# Altium footprint library IC.PcbLib: 19 footprints (part 1 of 2)
Each footprint in its own frame and in the unit in brackets; x right, y up, seen from the top. Pads: shape width x height; smd on the part's side, far side on the other; paste and mask are expansions set on the pad; w line width, h text height; cw(c..) or ccw(c..) is an arc to the next point about the centre after c.
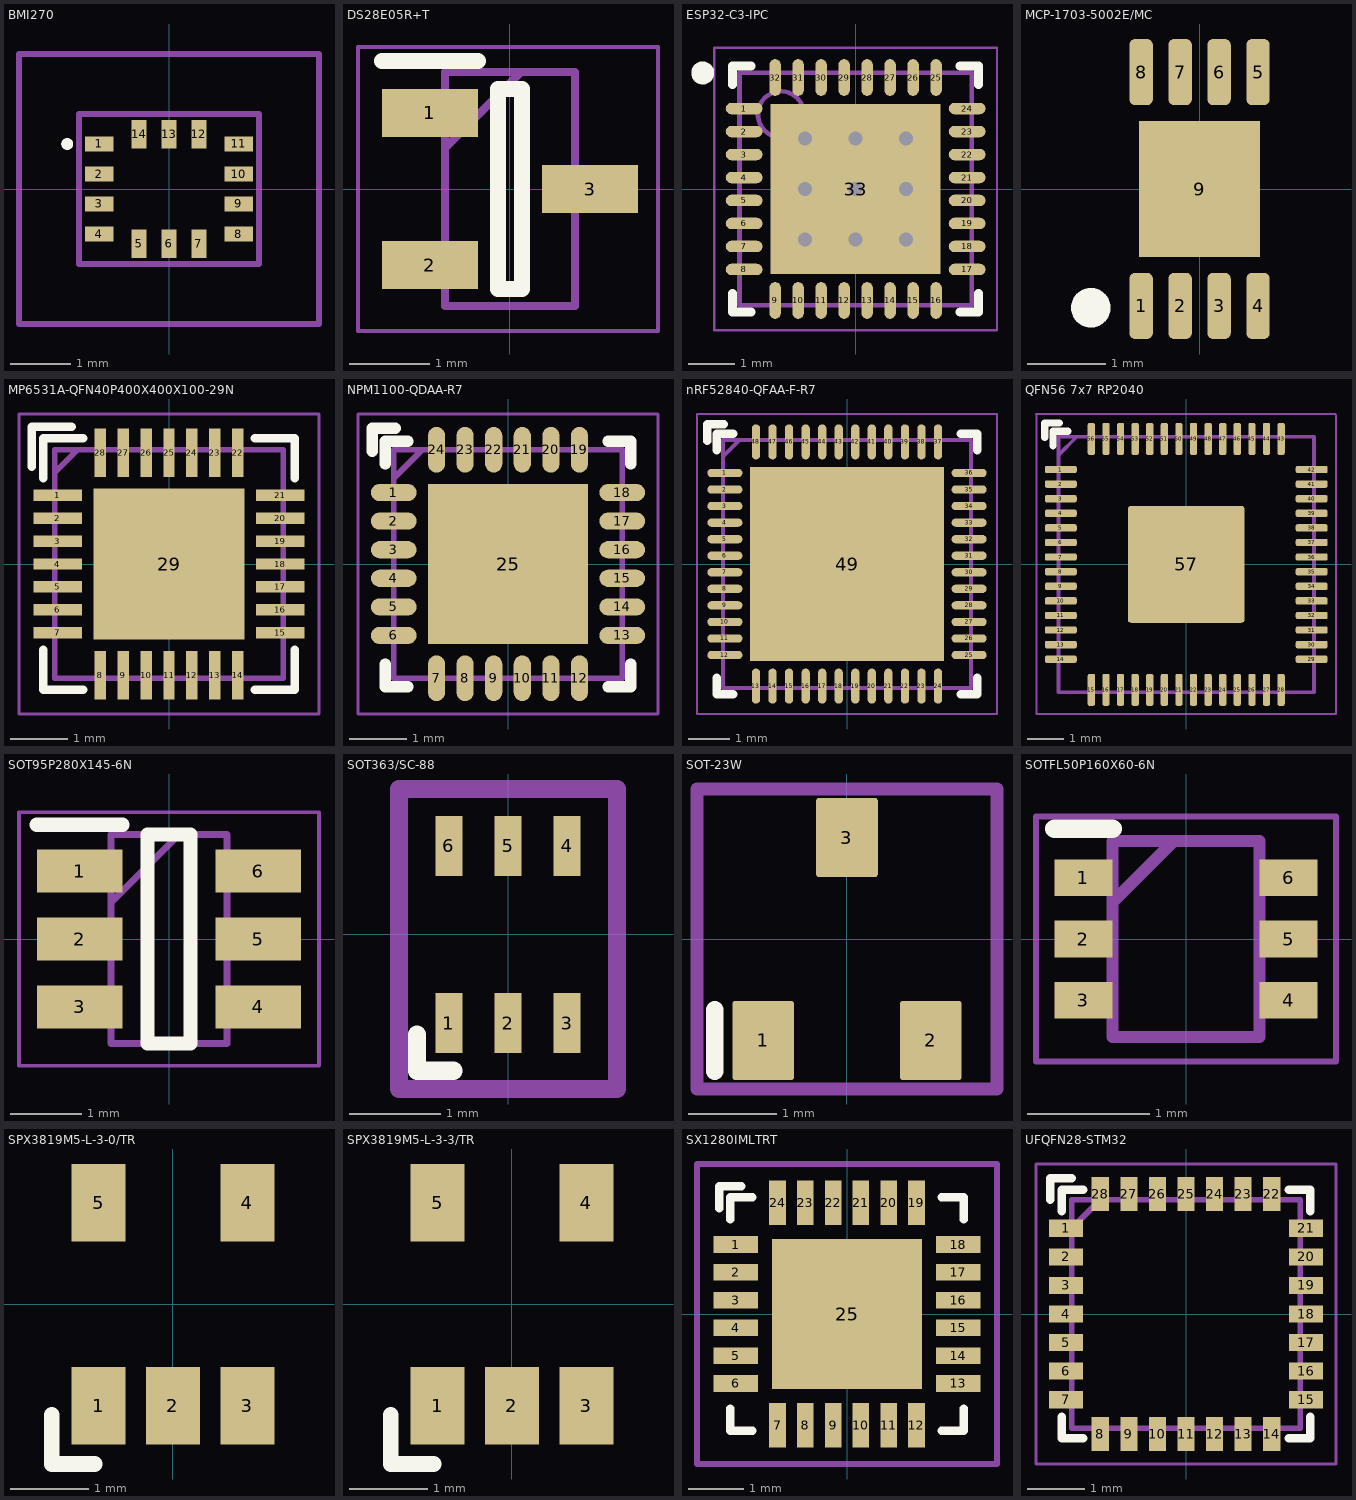
[diagram p0: the footprints below, top view; thin cyan lines are the x and y axes]

## BMI270 [mm]
pads (14):
  rect 0.475x0.25 smd paste-0.01 mask+0.04: 1(-1.163,0.75) 2(-1.163,0.25) 3(-1.163,-0.25) 4(-1.163,-0.75) 8(1.162,-0.75) 9(1.162,-0.25) 10(1.162,0.25) 11(1.162,0.75)
  rect 0.25x0.475 smd paste-0.01 mask+0.04: 5(-0.5,-0.913) 6(0,-0.913) 7(0.5,-0.913) 12(0.5,0.913) 13(0,0.913) 14(-0.5,0.913)
Top Overlay:
  lines w0.1: -1.746,0.75 ccw(c-1.696,0.75) -1.646,0.75 ccw(c-1.696,0.75) -1.746,0.75
Mechanical 15:
  lines w0.1: -1.5,-1.25 1.5,-1.25 1.5,1.25 -1.5,1.25 -1.5,-1.25
Mechanical 20:
  lines w0.1: -2.5,-2.25 2.5,-2.25 2.5,2.25 -2.5,2.25 -2.5,-2.25
3D body "BMI270.stp": height 0.7, standoff -0.13, extent -1.5,-1.25 1.5,1.25

## DS28E05R+T [mm] "EEPROM 1-Wire 112-BYTE EEPROM, SOT23 T&R"
pads (3):
  rect 1.2x0.6 smd: 1(-1,0.95) 2(-1,-0.95) 3(1,0)
Top Overlay:
  lines w0.2: -1.6,1.6 -0.4,1.6 ; -0.15,-1.25 -0.15,1.25 0.15,1.25 0.15,-1.25 -0.15,-1.25
Mechanical 13:
  lines w0.1: -0.812,0.512 0.138,1.462 ; -0.812,-1.462 0.812,-1.462 0.812,1.462 -0.812,1.462 -0.812,-1.462
Mechanical 15:
  lines w0.05: -1.9,-1.775 1.85,-1.775 1.85,1.775 -1.9,1.775 -1.9,-1.775
3D body "DS28E05R+T.stp": height 1.12, standoff 0, extent -1.185,-1.46 1.185,1.46

## ESP32-C3-IPC [mm] "QFN, 32-Leads, Body 5,00x5,00mm, Pitch 0,50mm, Thermal Pad 3,70x3,70mm, IPC Medium Density"
height 0.9
pads (33):
  oval 0.8x0.25 smd: 1(-2.425,1.75) 2(-2.425,1.25) 3(-2.425,0.75) 4(-2.425,0.25) 5(-2.425,-0.25) 6(-2.425,-0.75) 7(-2.425,-1.25) 8(-2.425,-1.75) 17(2.425,-1.75) 18(2.425,-1.25) 19(2.425,-0.75) 20(2.425,-0.25) 21(2.425,0.25) 22(2.425,0.75) 23(2.425,1.25) 24(2.425,1.75)
  oval 0.25x0.8 smd: 9(-1.75,-2.425) 10(-1.25,-2.425) 11(-0.75,-2.425) 12(-0.25,-2.425) 13(0.25,-2.425) 14(0.75,-2.425) 15(1.25,-2.425) 16(1.75,-2.425) 25(1.75,2.425) 26(1.25,2.425) 27(0.75,2.425) 28(0.25,2.425) 29(-0.25,2.425) 30(-0.75,2.425) 31(-1.25,2.425) 32(-1.75,2.425)
  rect 3.7x3.7 smd: 33(0,0)
via -1.1,1.1 diameter 0.61 hole 0.305
via 0,1.1 diameter 0.61 hole 0.305
via 1.1,1.1 diameter 0.61 hole 0.305
via -1.1,0 diameter 0.61 hole 0.305
via 1.1,0 diameter 0.61 hole 0.305
via -1.1,-1.1 diameter 0.61 hole 0.305
via 0,-1.1 diameter 0.61 hole 0.305
via 1.1,-1.1 diameter 0.61 hole 0.305
via 0,0 diameter 0.61 hole 0.305
Top Overlay:
  circle w0.25: c-3.325,2.525 r0.125
  lines w0.2: -2.675,-2.275 -2.675,-2.675 -2.275,-2.675 ; -2.675,2.275 -2.675,2.675 -2.275,2.675 ; 2.275,-2.675 2.675,-2.675 2.675,-2.275 ; 2.275,2.675 2.675,2.675 2.675,2.275
Mechanical 13:
  circle w0.1: c-1.625,1.625 r0.5
  lines w0.1: -2.525,-2.525 -2.525,2.525 2.525,2.525 2.525,-2.525 -2.525,-2.525
Mechanical 15:
  lines w0.05: -3.075,-3.075 -3.075,3.075 3.075,3.075 3.075,-3.075 -3.075,-3.075
  lines w0.1: -0.5,0 0.5,0 ; 0,-0.5 0,0.5
3D body: height 0.9, standoff 0.05, extent -2.525,-2.525 2.525,2.525
3D body "ESP32-C3.stp": height 0.9, standoff 0, extent -2.55,-2.55 2.55,2.55

## MCP-1703-5002E/MC [mm] "2x3 DFN-8. 250mA. 16V max.  /  / Design notes:  /  - Thermal relief vias in pad 9 (EP) are advised! /  - Pins 2-3 and 5-7 are NC!"
pads (9):
  rrect50% 0.3x0.85 smd: 1(-0.75,-1.5) 2(-0.25,-1.5) 3(0.25,-1.5) 4(0.75,-1.5) 5(0.75,1.5) 6(0.25,1.5) 7(-0.25,1.5) 8(-0.75,1.5)
  rect 1.55x1.75 smd: 9(0,0)
Top Overlay:
  circle w0.254: c-1.397,-1.524 r0.127
3D body "MCP1703_2x3_8-DNF v2.step": height 1.02, standoff 0, extent -1.02,-1.52 1.02,1.52

## MP6531A-QFN40P400X400X100-29N [mm] "QFN40 for MP6531A"
pads (29):
  rect 0.85x0.2 smd paste-0.017 mask+0.035: 1(-1.95,1.2) 2(-1.95,0.8) 3(-1.95,0.4) 4(-1.95,0) 5(-1.95,-0.4) 6(-1.95,-0.8) 7(-1.95,-1.2) 15(1.95,-1.2) 16(1.95,-0.8) 17(1.95,-0.4) 18(1.95,0) 19(1.95,0.4) 20(1.95,0.8) 21(1.95,1.2)
  rect 0.2x0.85 smd paste-0.017 mask+0.035: 8(-1.2,-1.95) 9(-0.8,-1.95) 10(-0.4,-1.95) 11(0,-1.95) 12(0.4,-1.95) 13(0.8,-1.95) 14(1.2,-1.95) 22(1.2,1.95) 23(0.8,1.95) 24(0.4,1.95) 25(0,1.95) 26(-0.4,1.95) 27(-0.8,1.95) 28(-1.2,1.95)
  rect 2.65x2.65 smd paste-2539.97 mask+0.035: 29(0,0)
Top Overlay:
  lines w0.15: -2.4,1.7 -2.4,2.4 -1.7,2.4 ; -2.2,-1.5 -2.2,-2.2 -1.5,-2.2 ; -2.2,1.5 -2.2,2.2 -1.5,2.2 ; 1.5,-2.2 2.2,-2.2 2.2,-1.5 ; 1.5,2.2 2.2,2.2 2.2,1.5
Top Paste:
  region: -0.075,0.075 -0.075,1.175 -1.175,1.175 -1.175,0.075
  region: -0.075,-0.075 -1.175,-0.075 -1.175,-1.175 -0.075,-1.175
  region: 0.075,-0.075 0.075,-1.175 1.175,-1.175 1.175,-0.075
  rectangle: 0.075,0.076 1.175,1.176
Mechanical 13:
  lines w0.1: -2,1.6 -1.6,2 ; -2,-2 2,-2 2,2 -2,2 -2,-2
Mechanical 15:
  lines w0.05: -2.625,-2.625 2.625,-2.625 2.625,2.625 -2.625,2.625 -2.625,-2.625
3D body "QFN40-v3-MP6531AGR-Z.step": height 0.95, standoff 0, extent -2,-2 2,2

## NPM1100-QDAA-R7 [mm] "Battery Management Extremely compact Power Management IC (PMIC) QFN"
pads (25):
  rrect100% 0.8x0.3 smd mask+0.06: 1(-2,1.25) 2(-2,0.75) 3(-2,0.25) 4(-2,-0.25) 5(-2,-0.75) 6(-2,-1.25) 13(2,-1.25) 14(2,-0.75) 15(2,-0.25) 16(2,0.25) 17(2,0.75) 18(2,1.25)
  rrect100% 0.3x0.8 smd mask+0.06: 7(-1.25,-2) 8(-0.75,-2) 9(-0.25,-2) 10(0.25,-2) 11(0.75,-2) 12(1.25,-2) 19(1.25,2) 20(0.75,2) 21(0.25,2) 22(-0.25,2) 23(-0.75,2) 24(-1.25,2)
  rect 2.8x2.8 smd mask+0.06: 25(0,0)
Top Overlay:
  lines w0.2: -2.375,1.975 -2.375,2.375 -1.975,2.375 ; -2.15,-1.75 -2.15,-2.15 -1.75,-2.15 ; -2.15,1.75 -2.15,2.15 -1.75,2.15 ; 1.75,-2.15 2.15,-2.15 2.15,-1.75 ; 1.75,2.15 2.15,2.15 2.15,1.75
Mechanical 13:
  lines w0.1: -2,1.5 -1.5,2 ; -2,-2 2,-2 2,2 -2,2 -2,-2
Mechanical 15:
  lines w0.05: -2.625,-2.625 2.625,-2.625 2.625,2.625 -2.625,2.625 -2.625,-2.625
3D body "QFN24-nPM1100 v4.step": height 0.69, standoff 0, extent -2,-2 2,2

## nRF52840-QFAA-F-R7 [mm] "RF System on a Chip - SoC Multiprotocol Bluetooth 5.3 SoC supporting Bluetooth Low Energy, Bluetooth mesh, NFC, Thread and Zigbee"
pads (49):
  rrect100% 0.85x0.2 smd paste-0.01 mask+0.04: 1(-2.95,2.2) 2(-2.95,1.8) 3(-2.95,1.4) 4(-2.95,1) 5(-2.95,0.6) 6(-2.95,0.2) 7(-2.95,-0.2) 8(-2.95,-0.6) 9(-2.95,-1) 10(-2.95,-1.4) 11(-2.95,-1.8) 12(-2.95,-2.2) 25(2.95,-2.2) 26(2.95,-1.8) 27(2.95,-1.4) 28(2.95,-1) 29(2.95,-0.6) 30(2.95,-0.2) 31(2.95,0.2) 32(2.95,0.6) 33(2.95,1) 34(2.95,1.4) 35(2.95,1.8) 36(2.95,2.2)
  rrect100% 0.2x0.85 smd paste-0.01 mask+0.04: 13(-2.2,-2.95) 14(-1.8,-2.95) 15(-1.4,-2.95) 16(-1,-2.95) 17(-0.6,-2.95) 18(-0.2,-2.95) 19(0.2,-2.95) 20(0.6,-2.95) 21(1,-2.95) 22(1.4,-2.95) 23(1.8,-2.95) 24(2.2,-2.95) 37(2.2,2.95) 38(1.8,2.95) 39(1.4,2.95) 40(1,2.95) 41(0.6,2.95) 42(0.2,2.95) 43(-0.2,2.95) 44(-0.6,2.95) 45(-1,2.95) 46(-1.4,2.95) 47(-1.8,2.95) 48(-2.2,2.95)
  rect 4.7x4.7 smd paste-2539.97 mask+0.04: 49(0,0)
Top Overlay:
  lines w0.2: -3.375,2.975 -3.375,3.375 -2.975,3.375 ; -3.15,-2.75 -3.15,-3.15 -2.75,-3.15 ; -3.15,2.75 -3.15,3.15 -2.75,3.15 ; 2.75,-3.15 3.15,-3.15 3.15,-2.75 ; 2.75,3.15 3.15,3.15 3.15,2.75
Top Paste:
  rectangle: 0.837,-0.675 2.187,0.675
  region: -0.837,0.675 -2.187,0.675 -2.187,-0.675 -0.837,-0.675
  rectangle: -0.675,-0.675 0.675,0.675
  rectangle: -0.675,0.837 0.675,2.187
  rectangle: 0.837,0.837 2.187,2.187
  region: -0.837,2.187 -2.187,2.187 -2.187,0.837 -0.837,0.837
  rectangle: -0.675,-2.187 0.675,-0.837
  rectangle: 0.837,-2.187 2.187,-0.837
  region: -0.837,-0.837 -2.187,-0.837 -2.187,-2.187 -0.837,-2.187
Mechanical 13:
  lines w0.1: -3,2.6 -2.6,3 ; -3,-3 -3,3 3,3 3,-3 -3,-3
Mechanical 15:
  lines w0.05: -3.625,-3.625 -3.625,3.625 3.625,3.625 3.625,-3.625 -3.625,-3.625
3D body "QFN48-nRF52840 v2.step": height 0.65, standoff -0.04, extent -3,-3 3,3

## QFN56 7x7 RP2040 [mm] "Recommended PCB / Footprint for the / RP2040 QFN-56 / package"
pads (57):
  rrect50% 0.875x0.2 smd paste-0.02 mask+0.04: 1(-3.437,2.6) 2(-3.437,2.2) 3(-3.437,1.8) 4(-3.437,1.4) 5(-3.437,1) 6(-3.437,0.6) 7(-3.437,0.2) 8(-3.437,-0.2) 9(-3.437,-0.6) 10(-3.437,-1) 11(-3.437,-1.4) 12(-3.437,-1.8) 13(-3.437,-2.2) 14(-3.437,-2.6) 29(3.437,-2.6) 30(3.437,-2.2) 31(3.437,-1.8) 32(3.437,-1.4) 33(3.437,-1) 34(3.437,-0.6) 35(3.437,-0.2) 36(3.437,0.2) 37(3.437,0.6) 38(3.437,1) 39(3.437,1.4) 40(3.437,1.8) 41(3.437,2.2) 42(3.437,2.6)
  rrect50% 0.2x0.875 smd paste-0.02 mask+0.04: 15(-2.6,-3.437) 16(-2.2,-3.437) 17(-1.8,-3.437) 18(-1.4,-3.437) 19(-1,-3.437) 20(-0.6,-3.437) 21(-0.2,-3.437) 22(0.2,-3.437) 23(0.6,-3.437) 24(1,-3.437) 25(1.4,-3.437) 26(1.8,-3.437) 27(2.2,-3.437) 28(2.6,-3.437) 43(2.6,3.437) 44(2.2,3.437) 45(1.8,3.437) 46(1.4,3.437) 47(1,3.437) 48(0.6,3.437) 49(0.2,3.437) 50(-0.2,3.437) 51(-0.6,3.437) 52(-1,3.437) 53(-1.4,3.437) 54(-1.8,3.437) 55(-2.2,3.437) 56(-2.6,3.437)
  rrect5% 3.2x3.2 smd paste-2539.97 mask+0.04: 57(0,0)
Top Overlay:
  lines w0.2: -3.875,3.475 -3.875,3.875 -3.475,3.875 ; -3.65,3.25 -3.65,3.65 -3.25,3.65
Top Paste:
  region: -0.1,-0.1 -1.3,-0.1 -1.3,-1.3 -0.1,-1.3
  region: 0.1,-0.1 0.1,-1.3 1.3,-1.3 1.3,-0.1
  rectangle: 0.1,0.1 1.3,1.3
  region: -0.1,0.1 -0.1,1.3 -1.3,1.3 -1.3,0.1
Mechanical 13:
  lines w0.1: -3.5,3 -3,3.5 ; -3.5,-3.5 -3.5,3.5 3.5,3.5 3.5,-3.5 -3.5,-3.5
Mechanical 15:
  lines w0.05: -4.113,4.121 4.087,4.121 ; -4.1,4.1 -4.1,-4.1 4.1,-4.1 4.1,4.1
3D body "rp2040.2.step": height 0.9, standoff 0, extent -3.5,-3.5 3.5,3.5

## SOT95P280X145-6N [mm]
pads (6):
  rect 1.2x0.6 smd: 1(-1.25,0.95) 2(-1.25,0) 3(-1.25,-0.95) 4(1.25,-0.95) 5(1.25,0) 6(1.25,0.95)
Top Overlay:
  lines w0.2: -1.85,1.6 -0.65,1.6 ; -0.3,-1.462 0.3,-1.462 0.3,1.462 -0.3,1.462 -0.3,-1.462
Mechanical 13:
  lines w0.1: -0.812,0.512 0.138,1.462 ; -0.812,-1.462 0.812,-1.462 0.812,1.462 -0.812,1.462 -0.812,-1.462
Mechanical 15:
  lines w0.05: -2.1,-1.775 2.1,-1.775 2.1,1.775 -2.1,1.775 -2.1,-1.775
3D body "USBLC6-2SC6.stp": height 1.45, standoff 0, extent -1.4,-1.462 1.4,1.462

## SOT363/SC-88 [mm] "6 LEADS"
pads (6):
  rect 0.3x0.66 smd mask+0.04: 1(-0.65,-0.975) 2(0,-0.975) 3(0.65,-0.975) 4(0.65,0.975) 5(0,0.975) 6(-0.65,0.975)
Top Overlay:
  lines w0.2: -1,-1.1 -1,-1.5 -0.6,-1.5
Mechanical 15:
  lines w0.2: -1.2,-1.7 1.2,-1.7 1.2,1.6 -1.2,1.6 -1.2,-1.7
3D body "SOT363 SC-88.step": height 0.95, standoff 0, extent -0.999,-1.05 0.999,1.05

## SOT-23W [mm] "Package LH, 3-Pin, 3mm x 2.9mm, slightly smaller box size (pads 0.1mm smaller in length)"
pads (3):
  rrect10% 0.7x0.9 smd mask+0.05: 1(-0.95,-1.15) 2(0.95,-1.15) 3(0,1.15)
Top Overlay:
  lines w0.2: -1.5,-1.5 -1.5,-0.8
Mechanical 15:
  lines w0.15: -1.7,-1.7 1.7,-1.7 1.7,1.7 -1.7,1.7 -1.7,-1.7
3D body "SOT-23W v3.step": height 1.06, standoff 0, extent -1.488,-1.451 1.488,1.451

## SOTFL50P160X60-6N [mm]
pads (6):
  rect 0.475x0.3 smd paste-0.009 mask+0.035: 1(-0.838,0.5) 2(-0.838,0) 3(-0.838,-0.5) 4(0.838,-0.5) 5(0.838,0) 6(0.838,0.5)
Top Overlay:
  lines w0.154: -1.075,0.9 -0.6,0.9
Mechanical 13:
  lines w0.1: -0.6,0.3 -0.1,0.8 ; -0.6,-0.8 0.6,-0.8 0.6,0.8 -0.6,0.8 -0.6,-0.8
Mechanical 15:
  lines w0.05: -1.225,-1 1.225,-1 1.225,1 -1.225,1 -1.225,-1
3D body "TPS61023DRLT.stp": height 0.6, standoff 0, extent -0.8,-0.8 0.8,0.8

## SPX3819M5-L-3-0/TR [mm] "LDO Voltage Regulators 500mA LOW NOISE LDO"
pads (5):
  rect 0.69x0.99 smd: 1(-0.95,-1.295) 2(0,-1.295) 3(0.95,-1.295) 4(0.95,1.295) 5(-0.95,1.295)
Top Overlay:
  lines w0.2: -1.545,-1.41 -1.545,-2.04 -1,-2.04
3D body "SPX3819M5-L-3-3_TR.stp": height 1.45, standoff 0, extent -1.45,-1.4 1.45,1.4

## SPX3819M5-L-3-3/TR [mm] "LDO Voltage Regulators 500mA LOW NOISE LDO"
pads (5):
  rect 0.69x0.99 smd: 1(-0.95,-1.295) 2(0,-1.295) 3(0.95,-1.295) 4(0.95,1.295) 5(-0.95,1.295)
Top Overlay:
  lines w0.2: -1.545,-1.41 -1.545,-2.04 -1,-2.04
3D body "SPX3819M5-L-3-3_TR.stp": height 1.45, standoff 0, extent -1.45,-1.4 1.45,1.4

## SX1280IMLTRT [mm] "RF Transceiver Long range 2.4 GHz Wireless Transceiver"
pads (25):
  rect 0.8x0.3 smd paste-0.02 mask+0.04: 1(-2,1.25) 2(-2,0.75) 3(-2,0.25) 4(-2,-0.25) 5(-2,-0.75) 6(-2,-1.25) 13(2,-1.25) 14(2,-0.75) 15(2,-0.25) 16(2,0.25) 17(2,0.75) 18(2,1.25)
  rect 0.3x0.8 smd paste-0.02 mask+0.04: 7(-1.25,-2) 8(-0.75,-2) 9(-0.25,-2) 10(0.25,-2) 11(0.75,-2) 12(1.25,-2) 19(1.25,2) 20(0.75,2) 21(0.25,2) 22(-0.25,2) 23(-0.75,2) 24(-1.25,2)
  rect 2.7x2.7 smd paste-2539.97 mask+0.04: 25(0,0)
Top Overlay:
  lines w0.15: -2.3,1.9 -2.3,2.3 -1.9,2.3 ; -2.1,-1.7 -2.1,-2.1 -1.7,-2.1 ; -2.1,1.7 -2.1,2.1 -1.7,2.1 ; 1.7,-2.1 2.1,-2.1 2.1,-1.7 ; 1.7,2.1 2.1,2.1 2.1,1.7
Top Paste:
  rectangle: 0.1,0.1 1.2,1.2
  region: -0.1,-0.1 -1.2,-0.1 -1.2,-1.2 -0.1,-1.2
  region: 0.1,-0.1 0.1,-1.2 1.2,-1.2 1.2,-0.1
  region: -0.1,0.1 -0.1,1.2 -1.2,1.2 -1.2,0.1
Mechanical 15:
  lines w0.1: -2.7,-2.7 2.7,-2.7 2.7,2.7 -2.7,2.7 -2.7,-2.7
3D body "QFN24 SX1280.step": height 0.9, standoff 0, extent -2,-2 2,2

## UFQFN28-STM32 [mm]
pads (28):
  rect 0.6x0.3 smd paste-0.02 mask+0.035: 1(-2.1,1.5) 2(-2.1,1) 3(-2.1,0.5) 4(-2.1,0) 5(-2.1,-0.5) 6(-2.1,-1) 7(-2.1,-1.5) 15(2.1,-1.5) 16(2.1,-1) 17(2.1,-0.5) 18(2.1,0) 19(2.1,0.5) 20(2.1,1) 21(2.1,1.5)
  rect 0.3x0.6 smd paste-0.02 mask+0.035: 8(-1.5,-2.1) 9(-1,-2.1) 10(-0.5,-2.1) 11(0,-2.1) 12(0.5,-2.1) 13(1,-2.1) 14(1.5,-2.1) 22(1.5,2.1) 23(1,2.1) 24(0.5,2.1) 25(0,2.1) 26(-0.5,2.1) 27(-1,2.1) 28(-1.5,2.1)
Top Overlay:
  lines w0.15: -2.375,2 -2.375,2.375 -2,2.375 ; -2.175,-1.8 -2.175,-2.175 -1.8,-2.175 ; -2.175,1.8 -2.175,2.175 -1.8,2.175 ; 1.8,-2.175 2.175,-2.175 2.175,-1.8 ; 1.8,2.175 2.175,2.175 2.175,1.8
Mechanical 13:
  lines w0.1: -2,1.5 -1.5,2 ; -2,-2 -2,2 2,2 2,-2 -2,-2
Mechanical 15:
  lines w0.05: -2.625,-2.625 -2.625,2.625 2.625,2.625 2.625,-2.625 -2.625,-2.625
3D body "QFN28-v3-UFQFN28-STM32.step": height 0.55, standoff 0, extent -2,-2 2,2